# Altium footprint library HFPB_01-PCBLib.PcbLib: 102 footprints (part 1 of 7)
Each footprint in its own frame and in the unit in brackets; x right, y up, seen from the top. Pads: shape width x height; smd on the part's side, far side on the other; paste and mask are expansions set on the pad; w line width, h text height; cw(c..) or ccw(c..) is an arc to the next point about the centre after c.
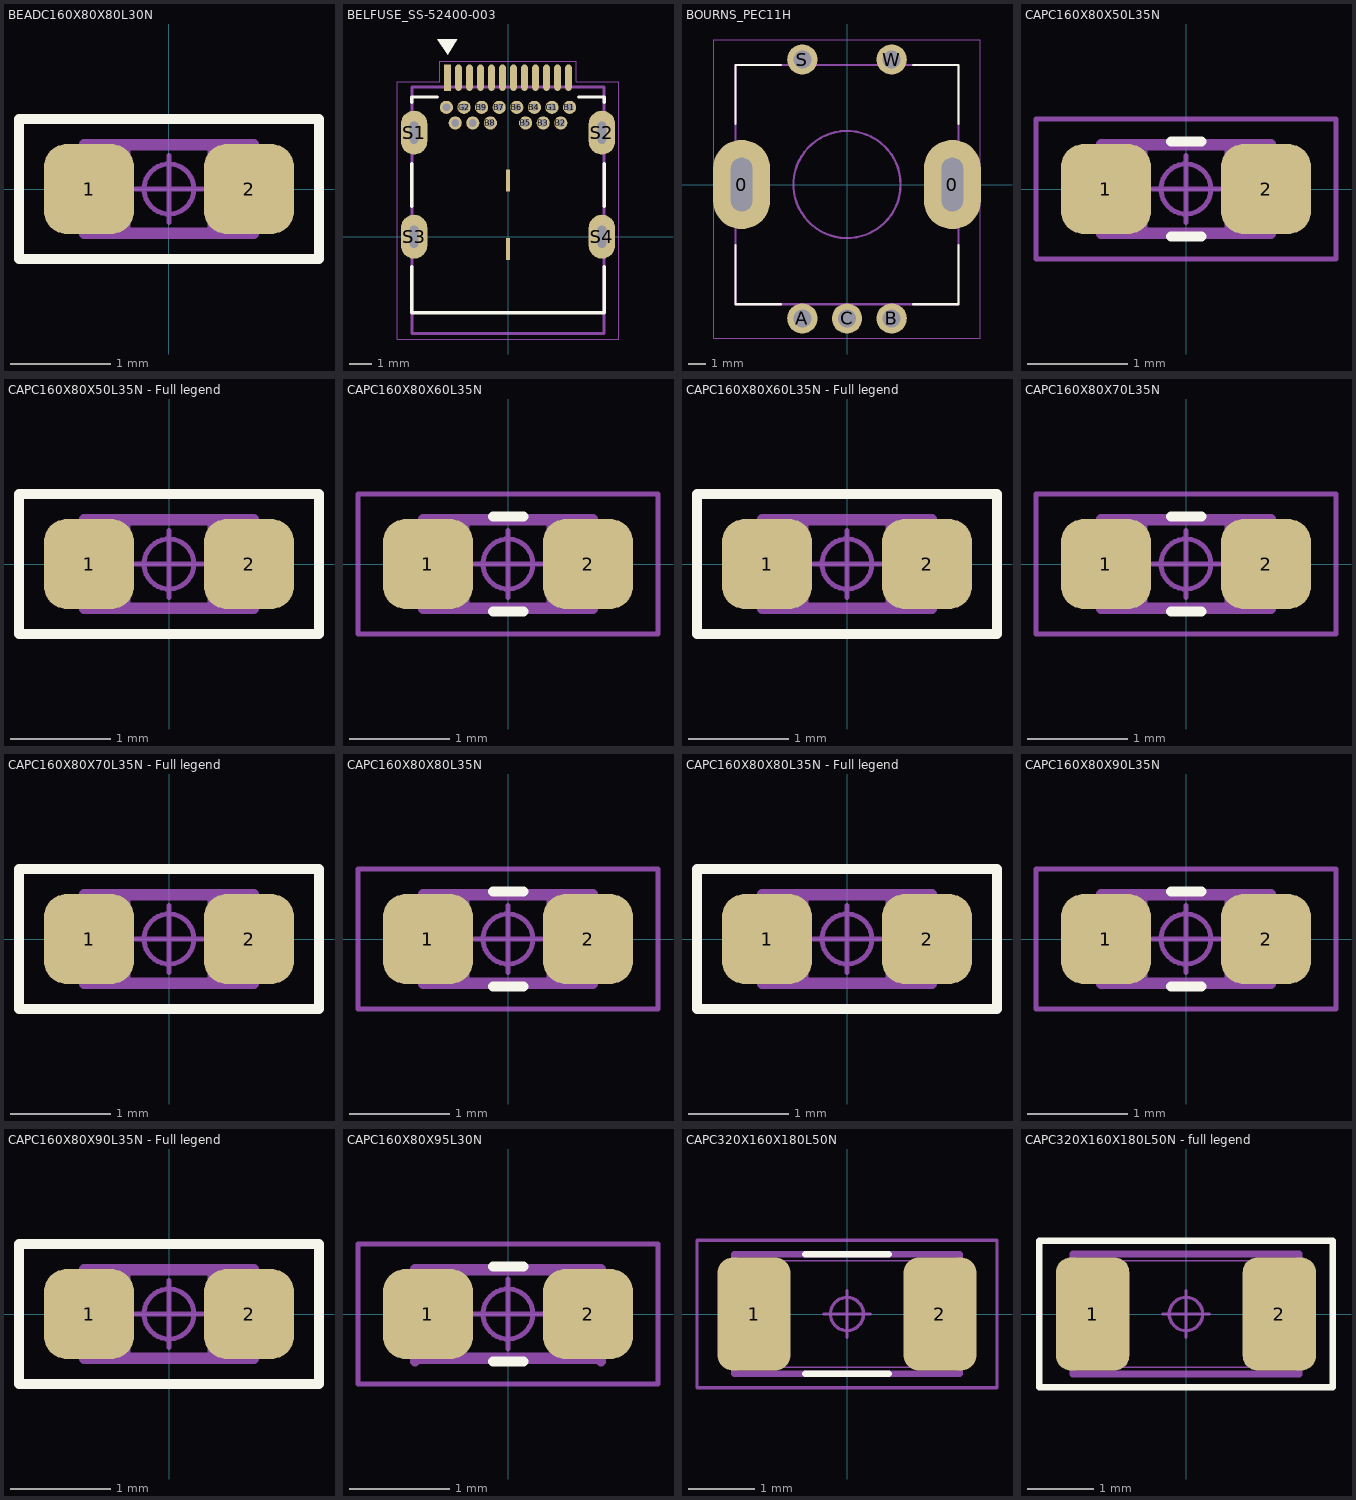
[diagram p0: the footprints below, top view; thin cyan lines are the x and y axes]

## BEADC160X80X80L30N [mm] "Ferrite Bead, Chip; 1.60 mm L X 0.80 mm W X 0.80 mm H body"
height 0.8
pads (2):
  rrect51% 0.9x0.9 smd: 1(-0.8,0) 2(0.8,0)
Top Overlay:
  lines w0.1: -1.5,-0.7 1.5,-0.7 1.5,0.7 -1.5,0.7 -1.5,-0.7
Mechanical 11:
  lines w0.1: -0.85,-0.45 0.85,-0.45 0.85,0.45 -0.85,0.45 -0.85,-0.45
Mechanical 12:
  lines w0.025: -0.8,-0.4 0.8,-0.4 ; -0.8,-0.4 -0.8,0.4 ; -0.8,-0.4 -0.8,0.4 ; -0.8,-0.4 -0.4,-0.4 -0.4,0.4 -0.8,0.4 ; -0.8,0.4 0.8,0.4 ; 0.8,-0.4 0.8,0.4 ; 0.8,-0.4 0.4,-0.4 0.4,0.4 0.8,0.4 ; 0.8,-0.4 0.8,0.4
Mechanical 15:
  circle w0.05: c0,0 r0.25
  lines w0.05: -0.335,0 0.335,0 ; 0,-0.335 0,0.335 ; -1.5,-0.7 1.5,-0.7 1.5,0.7 -1.5,0.7 -1.5,-0.7
Mechanical 16:
  text ".Designator" at 0,1.625 h1.2
3D body "BEADC160X80X80L30.STEP": height 0.8, standoff 0, extent -0.8,-0.4 0.8,0.4

## BELFUSE_SS-52400-003 [mm]
pads (32):
  rect 0.3x1.2 smd: A1(-2.75,7.23)
  oval 0.3x1.2 smd: A2(-2.25,7.23) A3(-1.75,7.23) A4(-1.25,7.23) A5(-0.75,7.23) A6(-0.25,7.23) A7(0.25,7.23) A8(0.75,7.23) A9(1.25,7.23) A10(1.75,7.23) A11(2.25,7.23) A12(2.75,7.23)
  round 0.6 hole 0.35: B1(2.8,5.88) B2(2.4,5.17) B3(1.6,5.17) B4(1.2,5.88) B5(0.8,5.17) B6(0.4,5.88) B7(-0.4,5.88) B8(-0.8,5.17) B9(-1.2,5.88) B10(-1.6,5.17) B11(-2.4,5.17) B12(-2.8,5.88) G1(2,5.88) G2(-2,5.88)
  rect 0.2x1 smd: G3(0,2.55) G4(0,-0.55)
  oval 1.2x2 hole 0.4 slot 1 at 90 deg: S1(-4.27,4.73) S2(4.27,4.73) S3(-4.27,0) S4(4.27,0)
Top Overlay:
  region: -2.314,8.988 -3.221,8.988 -2.749,8.262
  lines w0.15: -4.375,1.375 -4.375,3.325 ; -4.37,-1.37 -4.37,-3.45 4.37,-3.45 4.37,-1.37 ; -4.37,6.1 -4.37,6.35 -3.22,6.35 ; 3.22,6.35 4.37,6.35 4.37,6.1 ; 4.375,1.375 4.375,3.325
Mechanical 13:
  lines w0.127: 4.37,-3.45 -4.37,-3.45 ; -4.37,-3.45 -4.37,6.8 4.37,6.8 4.37,-4.4 -4.37,-4.4 -4.37,-3.45
Mechanical 15:
  lines w0.05: -5.045,-4.65 5.045,-4.65 5.045,7.05 3.1,7.05 3.1,7.98 -3.1,7.98 -3.1,7.05 -5.045,7.05 -5.045,-4.65
3D body "SS-52400-003--3DModel-STEP-56544.STEP": height 2.96, standoff -1.9, extent -4.37,-4.416 4.37,7.414

## BOURNS_PEC11H [mm]
pads (7):
  oval 3.2x5 hole 1.2 slot 3 at 90 deg: 0(-5.9,0) 0(5.9,0)
  round 1.7 hole 1: A(-2.5,-7.5) B(2.5,-7.5) C(0,-7.5) S(-2.5,7) W(2.5,7)
Top Overlay:
  lines w0.127: -6.25,-3.4 -6.25,-6.7 -3.7,-6.7 ; -6.25,3.4 -6.25,6.7 -3.7,6.7 ; 3.7,-6.7 6.25,-6.7 6.25,-3.4 ; 3.7,6.7 6.25,6.7 6.25,3.4
Mechanical 13:
  circle w0.127: c0,0 r3
  lines w0.127: -6.25,-6.7 6.25,-6.7 6.25,6.7 -6.25,6.7 -6.25,-6.7
Mechanical 15:
  lines w0.05: -7.45,-8.6 -7.45,8.1 7.45,8.1 7.45,-8.6 -7.45,-8.6
3D body "PEC11R-4215F-S0024--3DModel-STEP-56544.STEP": height 21.6, standoff -3.6, extent -6.923,-7.6 6.923,7.1

## CAPC160X80X50L35N [mm] "Capacitor, Chip; 1.60 mm L X 0.80 mm W X 0.50 mm H body"
height 0.5
pads (2):
  rrect51% 0.9x0.9 smd: 1(-0.8,0) 2(0.8,0)
Top Overlay:
  lines w0.1: -0.15,-0.475 0.155,-0.475 ; -0.15,0.475 0.155,0.475
Mechanical 11:
  lines w0.1: -0.85,-0.45 -0.85,0.45 0.85,0.45 0.85,-0.45 -0.85,-0.45
Mechanical 12:
  lines w0.025: -0.8,-0.4 -0.4,-0.4 -0.4,0.4 -0.8,0.4 ; -0.8,-0.4 -0.8,0.4 ; -0.8,-0.4 -0.8,0.4 ; -0.8,-0.4 0.8,-0.4 ; -0.8,0.4 0.8,0.4 ; 0.8,-0.4 0.8,0.4 ; 0.8,-0.4 0.4,-0.4 0.4,0.4 0.8,0.4 ; 0.8,-0.4 0.8,0.4
Mechanical 15:
  circle w0.05: c0,0 r0.25
  lines w0.05: -0.335,0 0.335,0 ; 0,-0.335 0,0.335 ; -1.5,-0.7 -1.5,0.7 1.5,0.7 1.5,-0.7 -1.5,-0.7
Mechanical 16:
  text ".Designator" at -1.575,1.125 h1.2
3D body "CAPC160X80X50L35.STEP": height 0.5, standoff 0, extent -0.8,-0.4 0.8,0.4

## CAPC160X80X50L35N - Full legend [mm] "Capacitor, Chip; 1.60 mm L X 0.80 mm W X 0.50 mm H body"
height 0.5
pads (2):
  rrect51% 0.9x0.9 smd: 1(-0.8,0) 2(0.8,0)
Top Overlay:
  lines w0.1: -1.5,-0.7 1.5,-0.7 1.5,0.7 -1.5,0.7 -1.5,-0.7
Mechanical 11:
  lines w0.1: -0.85,-0.45 0.85,-0.45 0.85,0.45 -0.85,0.45 -0.85,-0.45
Mechanical 12:
  lines w0.025: -0.8,-0.4 0.8,-0.4 ; -0.8,-0.4 -0.8,0.4 ; -0.8,-0.4 -0.8,0.4 ; -0.8,-0.4 -0.4,-0.4 -0.4,0.4 -0.8,0.4 ; -0.8,0.4 0.8,0.4 ; 0.8,-0.4 0.8,0.4 ; 0.8,-0.4 0.4,-0.4 0.4,0.4 0.8,0.4 ; 0.8,-0.4 0.8,0.4
Mechanical 15:
  circle w0.05: c0,0 r0.25
  lines w0.05: -0.335,0 0.335,0 ; 0,-0.335 0,0.335 ; -1.5,-0.7 1.5,-0.7 1.5,0.7 -1.5,0.7 -1.5,-0.7
Mechanical 16:
  text ".Designator" at -1.575,1.125 h1.2
3D body "CAPC160X80X50L35.STEP": height 0.5, standoff 0, extent -0.8,-0.4 0.8,0.4

## CAPC160X80X60L35N [mm] "Capacitor, Chip; 1.60 mm L X 0.80 mm W X 0.60 mm H body"
height 0.6
pads (2):
  rrect51% 0.9x0.9 smd: 1(-0.8,0) 2(0.8,0)
Top Overlay:
  lines w0.1: -0.15,-0.475 0.155,-0.475 ; -0.15,0.475 0.155,0.475
Mechanical 11:
  lines w0.1: -0.85,-0.45 0.85,-0.45 0.85,0.45 -0.85,0.45 -0.85,-0.45
Mechanical 12:
  lines w0.025: -0.8,-0.4 0.8,-0.4 ; -0.8,-0.4 -0.8,0.4 ; -0.8,-0.4 -0.8,0.4 ; -0.8,-0.4 -0.4,-0.4 -0.4,0.4 -0.8,0.4 ; -0.8,0.4 0.8,0.4 ; 0.8,-0.4 0.8,0.4 ; 0.8,-0.4 0.4,-0.4 0.4,0.4 0.8,0.4 ; 0.8,-0.4 0.8,0.4
Mechanical 15:
  circle w0.05: c0,0 r0.25
  lines w0.05: -0.335,0 0.335,0 ; 0,-0.335 0,0.335 ; -1.5,-0.7 1.5,-0.7 1.5,0.7 -1.5,0.7 -1.5,-0.7
Mechanical 16:
  text ".Designator" at -1.575,1.125 h1.2
3D body "CAPC160X80X60L35.STEP": height 0.6, standoff 0, extent -0.8,-0.4 0.8,0.4

## CAPC160X80X60L35N - Full legend [mm] "Capacitor, Chip; 1.60 mm L X 0.80 mm W X 0.60 mm H body"
height 0.6
pads (2):
  rrect51% 0.9x0.9 smd: 1(-0.8,0) 2(0.8,0)
Top Overlay:
  lines w0.1: -1.5,-0.7 -1.5,0.7 1.5,0.7 1.5,-0.7 -1.5,-0.7
Mechanical 11:
  lines w0.1: -0.85,-0.45 -0.85,0.45 0.85,0.45 0.85,-0.45 -0.85,-0.45
Mechanical 12:
  lines w0.025: -0.8,-0.4 -0.4,-0.4 -0.4,0.4 -0.8,0.4 ; -0.8,-0.4 -0.8,0.4 ; -0.8,-0.4 -0.8,0.4 ; -0.8,-0.4 0.8,-0.4 ; -0.8,0.4 0.8,0.4 ; 0.8,-0.4 0.8,0.4 ; 0.8,-0.4 0.4,-0.4 0.4,0.4 0.8,0.4 ; 0.8,-0.4 0.8,0.4
Mechanical 15:
  circle w0.05: c0,0 r0.25
  lines w0.05: -0.335,0 0.335,0 ; 0,-0.335 0,0.335 ; -1.5,-0.7 -1.5,0.7 1.5,0.7 1.5,-0.7 -1.5,-0.7
Mechanical 16:
  text ".Designator" at -1.575,1.125 h1.2
3D body "CAPC160X80X60L35.STEP": height 0.6, standoff 0, extent -0.8,-0.4 0.8,0.4

## CAPC160X80X70L35N [mm] "Capacitor, Chip; 1.60 mm L X 0.80 mm W X 0.70 mm H body"
height 0.7
pads (2):
  rrect51% 0.9x0.9 smd: 1(-0.8,0) 2(0.8,0)
Top Overlay:
  lines w0.1: -0.15,-0.475 0.155,-0.475 ; -0.15,0.475 0.155,0.475
Mechanical 11:
  lines w0.1: -0.85,-0.45 -0.85,0.45 0.85,0.45 0.85,-0.45 -0.85,-0.45
Mechanical 12:
  lines w0.025: -0.8,-0.4 -0.4,-0.4 -0.4,0.4 -0.8,0.4 ; -0.8,-0.4 -0.8,0.4 ; -0.8,-0.4 -0.8,0.4 ; -0.8,-0.4 0.8,-0.4 ; -0.8,0.4 0.8,0.4 ; 0.8,-0.4 0.8,0.4 ; 0.8,-0.4 0.4,-0.4 0.4,0.4 0.8,0.4 ; 0.8,-0.4 0.8,0.4
Mechanical 15:
  circle w0.05: c0,0 r0.25
  lines w0.05: -0.335,0 0.335,0 ; 0,-0.335 0,0.335 ; -1.5,-0.7 -1.5,0.7 1.5,0.7 1.5,-0.7 -1.5,-0.7
Mechanical 16:
  text ".Designator" at -1.575,1.125 h1.2
3D body "CAPC160X80X70L35.STEP": height 0.7, standoff 0, extent -0.8,-0.4 0.8,0.4

## CAPC160X80X70L35N - Full legend [mm] "Capacitor, Chip; 1.60 mm L X 0.80 mm W X 0.70 mm H body"
height 0.7
pads (2):
  rrect51% 0.9x0.9 smd: 1(-0.8,0) 2(0.8,0)
Top Overlay:
  lines w0.1: -1.5,-0.7 -1.5,0.7 1.5,0.7 1.5,-0.7 -1.5,-0.7
Mechanical 11:
  lines w0.1: -0.85,-0.45 -0.85,0.45 0.85,0.45 0.85,-0.45 -0.85,-0.45
Mechanical 12:
  lines w0.025: -0.8,-0.4 -0.4,-0.4 -0.4,0.4 -0.8,0.4 ; -0.8,-0.4 -0.8,0.4 ; -0.8,-0.4 -0.8,0.4 ; -0.8,-0.4 0.8,-0.4 ; -0.8,0.4 0.8,0.4 ; 0.8,-0.4 0.8,0.4 ; 0.8,-0.4 0.4,-0.4 0.4,0.4 0.8,0.4 ; 0.8,-0.4 0.8,0.4
Mechanical 15:
  circle w0.05: c0,0 r0.25
  lines w0.05: -0.335,0 0.335,0 ; 0,-0.335 0,0.335 ; -1.5,-0.7 -1.5,0.7 1.5,0.7 1.5,-0.7 -1.5,-0.7
Mechanical 16:
  text ".Designator" at -1.575,1.125 h1.2
3D body "CAPC160X80X70L35.STEP": height 0.7, standoff 0, extent -0.8,-0.4 0.8,0.4

## CAPC160X80X80L35N [mm] "Capacitor, Chip; 1.60 mm L X 0.80 mm W X 0.80 mm H body"
height 0.8
pads (2):
  rrect51% 0.9x0.9 smd: 1(-0.8,0) 2(0.8,0)
Top Overlay:
  lines w0.1: -0.15,-0.475 0.155,-0.475 ; -0.15,0.475 0.155,0.475
Mechanical 11:
  lines w0.1: -0.85,-0.45 0.85,-0.45 0.85,0.45 -0.85,0.45 -0.85,-0.45
Mechanical 12:
  lines w0.025: -0.8,-0.4 0.8,-0.4 ; -0.8,-0.4 -0.8,0.4 ; -0.8,-0.4 -0.8,0.4 ; -0.8,-0.4 -0.4,-0.4 -0.4,0.4 -0.8,0.4 ; -0.8,0.4 0.8,0.4 ; 0.8,-0.4 0.8,0.4 ; 0.8,-0.4 0.4,-0.4 0.4,0.4 0.8,0.4 ; 0.8,-0.4 0.8,0.4
Mechanical 15:
  circle w0.05: c0,0 r0.25
  lines w0.05: -0.335,0 0.335,0 ; 0,-0.335 0,0.335 ; -1.5,-0.7 1.5,-0.7 1.5,0.7 -1.5,0.7 -1.5,-0.7
Mechanical 16:
  text ".Designator" at -1.575,1.125 h1.2
3D body "CAPC160X80X80L35.STEP": height 0.8, standoff 0, extent -0.8,-0.4 0.8,0.4

## CAPC160X80X80L35N - Full legend [mm] "Capacitor, Chip; 1.60 mm L X 0.80 mm W X 0.80 mm H body"
height 0.8
pads (2):
  rrect51% 0.9x0.9 smd: 1(-0.8,0) 2(0.8,0)
Top Overlay:
  lines w0.1: -1.5,-0.7 1.5,-0.7 1.5,0.7 -1.5,0.7 -1.5,-0.7
Mechanical 11:
  lines w0.1: -0.85,-0.45 -0.85,0.45 0.85,0.45 0.85,-0.45 -0.85,-0.45
Mechanical 12:
  lines w0.025: -0.8,-0.4 -0.4,-0.4 -0.4,0.4 -0.8,0.4 ; -0.8,-0.4 -0.8,0.4 ; -0.8,-0.4 -0.8,0.4 ; -0.8,-0.4 0.8,-0.4 ; -0.8,0.4 0.8,0.4 ; 0.8,-0.4 0.8,0.4 ; 0.8,-0.4 0.4,-0.4 0.4,0.4 0.8,0.4 ; 0.8,-0.4 0.8,0.4
Mechanical 15:
  circle w0.05: c0,0 r0.25
  lines w0.05: -0.335,0 0.335,0 ; 0,-0.335 0,0.335 ; -1.5,-0.7 -1.5,0.7 1.5,0.7 1.5,-0.7 -1.5,-0.7
Mechanical 16:
  text ".Designator" at -1.575,1.125 h1.2
3D body "CAPC160X80X80L35.STEP": height 0.8, standoff 0, extent -0.8,-0.4 0.8,0.4

## CAPC160X80X90L35N [mm] "Capacitor, Chip; 1.60 mm L X 0.80 mm W X 0.90 mm H body"
height 0.9
pads (2):
  rrect51% 0.9x0.9 smd: 1(-0.8,0) 2(0.8,0)
Top Overlay:
  lines w0.1: -0.15,-0.475 0.155,-0.475 ; -0.15,0.475 0.155,0.475
Mechanical 11:
  lines w0.1: -0.85,-0.45 0.85,-0.45 0.85,0.45 -0.85,0.45 -0.85,-0.45
Mechanical 12:
  lines w0.025: -0.8,-0.4 0.8,-0.4 ; -0.8,-0.4 -0.8,0.4 ; -0.8,-0.4 -0.8,0.4 ; -0.8,-0.4 -0.4,-0.4 -0.4,0.4 -0.8,0.4 ; -0.8,0.4 0.8,0.4 ; 0.8,-0.4 0.8,0.4 ; 0.8,-0.4 0.4,-0.4 0.4,0.4 0.8,0.4 ; 0.8,-0.4 0.8,0.4
Mechanical 15:
  circle w0.05: c0,0 r0.25
  lines w0.05: -0.335,0 0.335,0 ; 0,-0.335 0,0.335 ; -1.5,-0.7 1.5,-0.7 1.5,0.7 -1.5,0.7 -1.5,-0.7
Mechanical 16:
  text ".Designator" at -1.575,1.125 h1.2
3D body "CAPC160X80X90L35.STEP": height 0.9, standoff 0, extent -0.8,-0.4 0.8,0.4

## CAPC160X80X90L35N - Full legend [mm] "Capacitor, Chip; 1.60 mm L X 0.80 mm W X 0.90 mm H body"
height 0.9
pads (2):
  rrect51% 0.9x0.9 smd: 1(-0.8,0) 2(0.8,0)
Top Overlay:
  lines w0.1: -1.5,-0.7 1.5,-0.7 1.5,0.7 -1.5,0.7 -1.5,-0.7
Mechanical 11:
  lines w0.1: -0.85,-0.45 0.85,-0.45 0.85,0.45 -0.85,0.45 -0.85,-0.45
Mechanical 12:
  lines w0.025: -0.8,-0.4 0.8,-0.4 ; -0.8,-0.4 -0.8,0.4 ; -0.8,-0.4 -0.8,0.4 ; -0.8,-0.4 -0.4,-0.4 -0.4,0.4 -0.8,0.4 ; -0.8,0.4 0.8,0.4 ; 0.8,-0.4 0.8,0.4 ; 0.8,-0.4 0.4,-0.4 0.4,0.4 0.8,0.4 ; 0.8,-0.4 0.8,0.4
Mechanical 15:
  circle w0.05: c0,0 r0.25
  lines w0.05: -0.335,0 0.335,0 ; 0,-0.335 0,0.335 ; -1.5,-0.7 1.5,-0.7 1.5,0.7 -1.5,0.7 -1.5,-0.7
Mechanical 16:
  text ".Designator" at -1.575,1.125 h1.2
3D body "CAPC160X80X90L35.STEP": height 0.9, standoff 0, extent -0.8,-0.4 0.8,0.4

## CAPC160X80X95L30N [mm] "Capacitor, Chip; 1.60 mm L X 0.80 mm W X 0.95 mm H body"
height 0.95
pads (2):
  rrect50% 0.9x0.9 smd: 1(-0.8,0) 2(0.8,0)
Top Overlay:
  lines w0.1: -0.15,-0.475 0.155,-0.475 ; -0.15,0.475 0.155,0.475
Mechanical 11:
  lines w0.1: -0.93,-0.475 -0.93,0.45 0.93,0.45 0.93,-0.475 ; -0.93,-0.45 0.93,-0.45 ; -0.85,-0.45 0.85,-0.45 ; -0.85,0.45 0.85,0.45
Mechanical 12:
  lines w0.025: -0.8,-0.4 -0.5,-0.4 -0.5,0.4 -0.8,0.4 ; -0.8,-0.4 -0.8,0.4 ; -0.8,-0.4 -0.8,0.4 ; -0.8,-0.4 0.8,-0.4 ; -0.8,0.4 0.8,0.4 ; 0.8,-0.4 0.8,0.4 ; 0.8,-0.4 0.5,-0.4 0.5,0.4 0.8,0.4 ; 0.8,-0.4 0.8,0.4
Mechanical 15:
  circle w0.05: c0,0 r0.25
  lines w0.05: -0.35,0 0.35,0 ; 0,-0.35 0,0.35 ; -1.5,-0.7 -1.5,0.7 1.5,0.7 1.5,-0.7 -1.5,-0.7
Mechanical 16:
  text ".Designator" at -1.5,0.8 h1.2
3D body "CAPC160X80X95L30.STEP": height 0.95, standoff 0, extent -0.8,-0.4 0.8,0.4

## CAPC320X160X180L50N [mm] "Capacitor, Chip; 3.20 mm L X 1.60 mm W X 1.80 mm H body"
height 1.8
pads (2):
  rrect42% 1.1x1.7 smd: 1(-1.4,0) 2(1.4,0)
Top Overlay:
  lines w0.1: -0.625,-0.9 0.625,-0.9 ; -0.625,0.9 0.625,0.9
Mechanical 11:
  lines w0.1: -1.7,-0.9 1.7,-0.9 1.7,0.9 -1.7,0.9 -1.7,-0.9
Mechanical 12:
  lines w0.025: -1.6,-0.8 1.6,-0.8 ; -1.6,-0.8 -1.6,0.8 ; -1.6,-0.8 -1.6,0.8 ; -1.6,-0.8 -1.1,-0.8 -1.1,0.8 -1.6,0.8 ; -1.6,0.8 1.6,0.8 ; 1.6,-0.8 1.6,0.8 ; 1.6,-0.8 1.1,-0.8 1.1,0.8 1.6,0.8 ; 1.6,-0.8 1.6,0.8
Mechanical 15:
  circle w0.05: c0,0 r0.25
  lines w0.05: -0.35,0 0.35,0 ; 0,-0.35 0,0.35 ; -2.26,-1.11 2.26,-1.11 2.26,1.11 -2.26,1.11 -2.26,-1.11
Mechanical 16:
  text ".Designator" at -2.25,1.25 h1.2
3D body "CAPC320X160X180L50.STEP": height 1.8, standoff 0, extent -1.6,-0.8 1.6,0.8

## CAPC320X160X180L50N - full legend [mm] "Capacitor, Chip; 3.20 mm L X 1.60 mm W X 1.80 mm H body"
height 1.8
pads (2):
  rrect40% 1.1x1.7 smd: 1(-1.4,0) 2(1.4,0)
Top Overlay:
  lines w0.1: -2.2,-1.1 2.2,-1.1 2.2,1.1 -2.2,1.1 -2.2,-1.1
Mechanical 11:
  lines w0.1: -1.7,-0.9 1.7,-0.9 1.7,0.9 -1.7,0.9 -1.7,-0.9
Mechanical 12:
  lines w0.025: -1.6,-0.8 1.6,-0.8 ; -1.6,-0.8 -1.6,0.8 ; -1.6,-0.8 -1.6,0.8 ; -1.6,-0.8 -1.1,-0.8 -1.1,0.8 -1.6,0.8 ; -1.6,0.8 1.6,0.8 ; 1.6,-0.8 1.6,0.8 ; 1.6,-0.8 1.1,-0.8 1.1,0.8 1.6,0.8 ; 1.6,-0.8 1.6,0.8
Mechanical 15:
  circle w0.05: c0,0 r0.25
  lines w0.05: -0.35,0 0.35,0 ; 0,-0.35 0,0.35 ; -2.2,-1.1 2.2,-1.1 2.2,1.1 -2.2,1.1 -2.2,-1.1
Mechanical 16:
  text ".Designator" at -2.25,1.375 h1.2
3D body "CAPC320X160X180L50.STEP": height 1.8, standoff 0, extent -1.6,-0.8 1.6,0.8